# Altium schematic symbol library STM32G491CET6.SchLib: 1 symbol
Pins are listed as number, name and electrical type; pins without a type are passive.

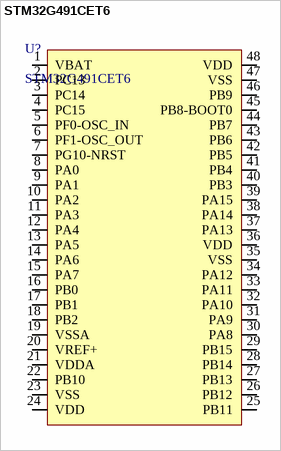
[diagram p0: symbol STM32G491CET6]

## STM32G491CET6
designator U?
IC: STM32 ARM microcontroller; 170MHz; LQFP48; 1.71÷3.6VDC
footprint QFP50P900X900X160-48N
pins: 1 VBAT (power), 2 PC13, 3 PC14, 4 PC15, 5 PF0-OSC_IN, 6 PF1-OSC_OUT, 7 PG10-NRST, 8 PA0, 9 PA1, 10 PA2, 11 PA3, 12 PA4, 13 PA5, 14 PA6, 15 PA7, 16 PB0, 17 PB1, 18 PB2, 19 VSSA (power), 20 VREF+ (power), 21 VDDA (power), 22 PB10, 23 VSS (power), 24 VDD (power), 25 PB11, 26 PB12, 27 PB13, 28 PB14, 29 PB15, 30 PA8, 31 PA9, 32 PA10, 33 PA11, 34 PA12, 35 VSS (power), 36 VDD (power), 37 PA13, 38 PA14, 39 PA15, 40 PB3, 41 PB4, 42 PB5, 43 PB6, 44 PB7, 45 PB8-BOOT0, 46 PB9, 47 VSS (power), 48 VDD (power)